# Altium footprint library nucleo-144.PcbLib: 1 footprints
Each footprint in its own frame and in the unit in brackets; x right, y up, seen from the top. Pads: shape width x height; smd on the part's side, far side on the other; paste and mask are expansions set on the pad; w line width, h text height; cw(c..) or ccw(c..) is an arc to the next point about the centre after c.
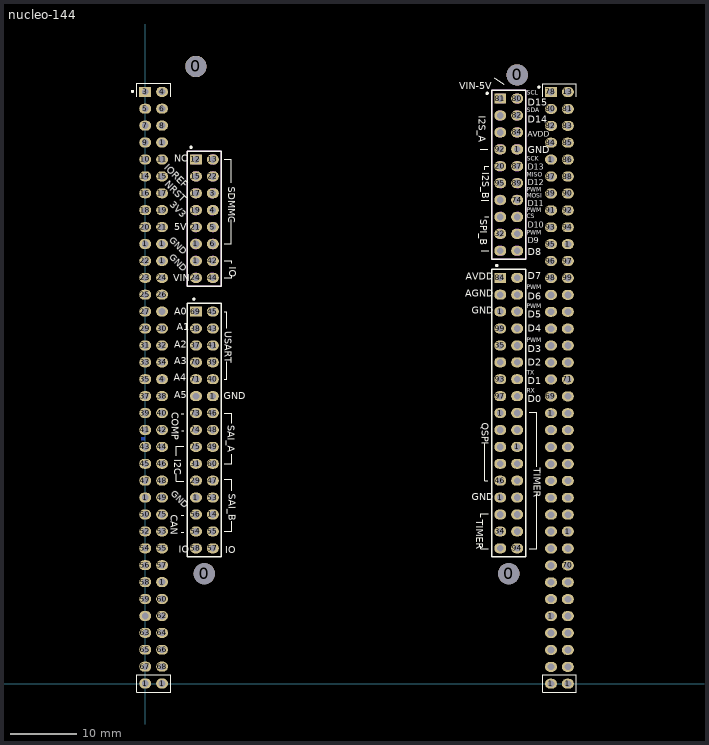
[diagram p0: the footprint, top view; thin cyan lines are the x and y axes]

## nucleo-144 [mm]
pads (248):
  round 3.2 hole 3.2 unplated: 0(7.62,92.71) 0(8.89,16.51) 0(54.61,16.51) 0(55.88,91.44)
  oval 1.8x1.5 hole 1.02: 1(0,0) 1(0,27.94) 1(0,66.04) 1(2.54,0) 1(2.54,15.24) 1(2.54,63.5) 1(2.54,66.04) 1(2.54,81.28) 1(7.62,27.94) 1(7.62,63.5) 1(7.62,66.04) 1(10.16,43.18) 1(53.34,27.94) 1(53.34,40.64) 1(53.34,55.88) 1(55.88,35.56) 1(55.88,80.264) 1(60.96,-0.025) 1(60.96,10.135) 1(60.96,40.615) 1(60.96,78.715) 1(63.5,-0.025) 1(63.5,22.835) 1(63.5,66.015) 3(10.16,73.66) 4(2.54,45.72) 4(2.54,88.9) 4(10.16,71.12) 5(0,86.36) 5(10.16,68.58) 6(2.54,86.36) 6(10.16,66.04) 7(0,83.82) 8(2.54,83.82) 9(0,81.28) 10(0,78.74) 11(2.54,78.74) 13(10.16,78.74) 13(63.5,88.875) 14(0,76.2) 14(10.16,25.4) 15(2.54,76.2) 15(7.62,76.2) 16(0,73.66) 17(2.54,73.66) 17(7.62,73.66) 18(0,71.12) 19(2.54,71.12) 19(7.62,71.12) 20(0,68.58) 20(53.34,77.724) 21(2.54,68.58) 21(7.62,68.58) 22(0,63.5) 22(10.16,76.2) 23(0,60.96) 24(2.54,60.96) 24(7.62,60.96) 25(0,58.42) 26(2.54,58.42) 27(0,55.88) 29(0,53.34) 29(7.62,30.48) 30(2.54,53.34) 31(0,50.8) 31(7.62,33.02) 32(2.54,50.8) 32(53.34,67.564) 33(0,48.26) 34(2.54,48.26) 34(53.34,22.86) 35(0,45.72) 35(53.34,50.8) 37(0,43.18) 37(7.62,50.8) 38(2.54,43.18) 38(7.62,53.34) 39(0,40.64) 39(10.16,48.26) 40(2.54,40.64) 40(10.16,45.72) 41(0,38.1) 41(10.16,50.8) 42(2.54,38.1) 42(10.16,63.5) 43(0,35.56) 43(10.16,53.34) 44(2.54,35.56) 44(10.16,60.96) 45(0,33.02) 45(10.16,55.88) 46(2.54,33.02) 46(10.16,40.64) 46(53.34,30.48) 47(0,30.48) 47(10.16,30.48) 48(2.54,30.48) 48(10.16,38.1) 49(2.54,27.94) 49(10.16,35.56) 50(0,25.4) 52(0,22.86) 53(2.54,22.86) 53(10.16,27.94) 54(0,20.32) 54(7.62,22.86) 55(2.54,20.32) 55(10.16,22.86) 56(0,17.78) 56(7.62,25.4) 57(2.54,17.78) 57(10.16,20.32) 58(0,15.24) 58(7.62,20.32) 59(0,12.7) 60(2.54,12.7) 60(10.16,33.02) 62(2.54,10.16) 63(0,7.62) 64(2.54,7.62) 65(0,5.08) 66(2.54,5.08) 67(0,2.54) 68(2.54,2.54) 69(60.96,43.155) 70(7.62,48.26) 70(63.5,17.755) 71(7.62,45.72) 71(63.5,45.695) 73(7.62,40.64) 74(7.62,38.1) 74(55.88,72.644) 75(2.54,25.4) 75(7.62,35.56) 80(55.88,87.884) 80(60.96,86.335) 81(63.5,86.335) 82(55.88,85.344) 82(60.96,83.795) 83(63.5,83.795) 84(55.88,82.804) 84(60.96,81.255) 85(63.5,81.255) 86(63.5,78.715) 87(55.88,77.724) 87(60.96,76.175) 88(63.5,76.175) 89(55.88,75.184) 89(60.96,73.635) 90(63.5,73.635) 91(60.96,71.095) 92(53.34,80.264) 92(63.5,71.095) 93(53.34,45.72) 93(60.96,68.555) 94(55.88,20.32) 94(63.5,68.555) 95(53.34,75.184) 95(60.96,66.015) 96(60.96,63.475) 97(53.34,43.18) 97(63.5,63.475) 98(60.96,60.935) 99(53.34,53.34) 99(63.5,60.935) 100(55.88,22.86) 100(60.96,58.395) 101(53.34,85.344) 101(63.5,58.395) 102(53.34,65.024) 102(60.96,55.855) 103(63.5,55.855) 104(53.34,72.644) 104(60.96,53.315) 105(53.34,82.804) 105(63.5,53.315) 106(53.34,70.104) 106(60.96,50.775) 107(53.34,58.42) 107(63.5,50.775) 108(60.96,48.235) 109(63.5,48.235) 110(60.96,45.695) 112(53.34,48.26) 112(63.5,43.155) 113(55.88,40.64) 113(63.5,40.615) 115(7.62,43.18) 115(63.5,38.075) 116(53.34,35.56) 116(60.96,35.535) 117(55.88,38.1) 117(63.5,35.535) 119(55.88,70.104) 119(63.5,32.995) 120(55.88,33.02) 120(60.96,30.455) 121(55.88,67.564) 121(63.5,30.455) 122(55.88,30.48) 122(60.96,27.915) 123(55.88,53.34) 123(63.5,27.915) 124(55.88,27.94) 124(60.96,25.375) 125(55.88,58.42) 125(63.5,25.375) 126(55.88,25.4) 126(60.96,22.835) 127(55.88,50.8) 127(60.96,20.295) 128(55.88,55.88) 128(63.5,20.295) 129(55.88,60.96) 129(60.96,17.755) 131(55.88,65.024) 131(60.96,15.215) 132(55.88,48.26) 132(63.5,15.215) 134(63.5,12.675) 135(53.34,20.32) 135(63.5,10.135) 136(60.96,7.595) 137(63.5,7.595) 138(60.96,5.055) 139(63.5,5.055) 140(60.96,2.515) 141(63.5,2.515) 144(55.88,45.72) 144(60.96,12.675) 145(0,10.16) 145(55.88,43.18) 146(53.34,38.1) 146(60.96,38.075) 148(53.34,33.02) 148(60.96,32.995) 149(2.54,55.88) 149(53.34,25.4)
  rect 1.8x1.5 hole 1.02: 3(0,88.9) 12(7.62,78.74) 69(7.62,55.88) 78(60.96,88.875) 81(53.34,87.884) 84(53.34,60.96)
Bottom Layer:
  pour cut-out: -0.567,37.033 -0.567,36.555 -0.051,36.555 -0.051,37.041
Top Overlay:
  circle w0.25: c-1.905,88.959 r0.127
  circle w0.25: c59.149,89.611 r0.127
  circle w0.25: c6.892,80.569 r0.127
  circle w0.25: c7.315,57.76 r0.127
  circle w0.25: c51.38,88.671 r0.127
  circle w0.25: c52.824,62.814 r0.127
  lines w0.127: -1.27,88.189 -1.27,90.17 3.81,90.17 3.81,88.189 ; 4.699,31.521 4.699,30.378 5.791,30.378 ; 4.699,34.214 4.699,35.662 5.791,35.662 ; 5.385,22.758 5.791,22.758 ; 5.385,25.298 5.791,25.298 ; 5.436,40.538 5.791,40.538 ; 5.486,37.998 5.791,37.998 ; 11.887,22.86 12.979,22.86 12.979,24.359 ; 11.887,30.683 12.979,30.683 12.979,28.956 ; 11.887,33.02 12.979,33.02 12.979,34.442 ; 11.887,40.64 12.979,40.64 12.979,39.141 ; 11.887,45.72 12.243,45.72 12.243,48.362 ; 11.887,55.88 12.243,55.88 12.243,53.391 ; 11.887,60.96 12.979,60.96 12.979,61.309 ; 11.887,63.5 12.979,63.5 12.979,63.119 ; 11.887,66.04 12.957,66.04 12.957,69.698 ; 11.887,78.74 12.957,78.74 12.957,75.235 ; 50.346,80.264 51.438,80.264 ; 50.419,20.625 50.419,20.218 51.511,20.218 ; 50.419,24.968 50.419,25.502 51.511,25.502 ; 50.521,65.024 51.613,65.024 ; 50.521,72.644 51.613,72.644 ; 51.003,36.03 51.003,30.48 51.489,30.48 ; 51.029,70.104 51.613,70.104 ; 51.029,77.165 51.029,77.724 51.613,77.724 ; 52.426,90.983 53.873,90.018 ; 57.709,20.218 58.801,20.218 58.801,28.448 ; 57.709,40.742 58.801,40.742 58.801,32.588 ; 59.69,88.163 59.69,90.145 64.77,90.145 64.77,88.163 ; 59.69,-1.295 59.69,1.295 64.77,1.295 64.77,-1.295 59.69,-1.295 ; 59.69,-1.295 59.69,-1.295 ; -1.27,-1.27 -1.27,1.321 3.81,1.321 3.81,-1.27 -1.27,-1.27
  lines w0.2: 6.35,19.05 6.35,57.15 11.43,57.15 11.43,19.05 6.35,19.05 ; 6.35,59.69 11.43,59.69 11.43,80.01 6.35,80.01 6.35,59.69 ; 52.07,19.05 57.15,19.05 57.15,62.23 52.07,62.23 52.07,19.05 ; 52.07,63.754 52.07,89.154 57.15,89.154 57.15,63.754 52.07,63.754
  text "TIMER" at 49.771,24.638 h1.02
  text "QSPI" at 50.571,39.218 h1.02
  text "GND" at 3.785,28.473 h0.97
  text "NC" at 4.338,78.359 h1.02
  text "PWM" at 57.353,73.635 h1.14
  text "PWM" at 57.353,70.587 h1.14
  text "D0" at 57.455,42.24 h1.02
  text "D1" at 57.455,44.983 h1.02
  text "GND" at 49.063,27.508 h1.02
  text "CS" at 57.353,69.647 h1.14
  text "MOSI" at 57.353,72.746 h1.14
  text "MISO" at 57.353,75.946 h1.14
  text "SCK" at 57.353,78.308 h1.14
  text "SDA" at 57.355,85.573 h1.14
  text "SCL" at 57.355,88.214 h1.14
  text "PWM" at 57.355,51.079 h1.14
  text "PWM" at 57.355,56.185 h1.14
  text "PWM" at 57.355,59 h1.14
  text "PWM" at 57.353,67.234 h1.14
  text "TIMER" at 58.369,32.41 h1.02
  text "SPI_B" at 50.317,69.774 h1.02
  text "I2S_A" at 50.114,85.319 h1.02
  text "COMP" at 4.013,40.792 h1.02
  text "I2C" at 4.369,33.731 h1.02
  text "CAN" at 3.861,25.375 h1.02
  text "SAI_B" at 12.522,28.524 h1.02
  text "SAI_A" at 12.37,38.786 h1.02
  text "USART" at 11.938,52.959 h1.02
  text "IO" at 12.649,62.636 h1.02
  text "SDMMC" at 12.497,74.676 h1.02
  text "GND" at 3.538,63.938 h0.97
  text "VIN" at 4.227,60.477 h1.02
  text "5V" at 4.343,68.123 h1.02
  text "3V3" at 3.632,71.882 h1.02
  text "NRST" at 2.845,74.93 h1.02
  text "GND" at 3.563,66.526 h0.97
  text "IOREF" at 2.819,77.445 h1.02
  text "D8" at 57.455,64.313 h1.02
  text "D9" at 57.455,66.167 h0.89
  text "D10" at 57.455,68.504 h0.89
  text "D11" at 57.455,71.679 h0.89
  text "D12" at 57.455,74.854 h0.89
  text "D13" at 57.455,77.165 h0.89
  text "GND" at 57.455,79.705 h1.02
  text "AVDD" at 57.455,82.169 h0.84
  text "D14" at 57.455,84.277 h1.02
  text "D15" at 57.455,86.843 h1.02
  text "D5" at 57.455,54.991 h1.02
  text "D4" at 57.455,52.857 h1.02
  text "D3" at 57.455,49.784 h1.02
  text "D2" at 57.455,47.752 h1.02
  text "TX" at 57.355,46.177 h1.14
  text "RX" at 57.355,43.491 h1.14
  text "D6" at 57.455,57.658 h1.02
  text "D7" at 57.455,60.731 h1.02
  text "A5" at 4.334,42.875 h1.02
  text "A4" at 4.285,45.466 h1.02
  text "A3" at 4.334,47.981 h1.02
  text "A2" at 4.334,50.419 h1.02
  text "A1" at 4.769,53.086 h1.02
  text "A0" at 4.334,55.423 h1.02
  text "VIN-5V" at 47.219,89.281 h1.02
  text "I2S_B" at 50.622,76.784 h1.02
  text "IO" at 12.014,19.609 h1.02
  text "IO" at 5.06,19.66 h1.02
  text "GND" at 11.786,42.697 h1.02
  text "GND" at 49.063,55.524 h1.02
  text "AGND" at 48.052,58.09 h1.02
  text "AVDD" at 48.158,60.655 h1.02
Bottom Overlay:
  lines w0.127: 51.384,57.353 51.46,57.353
  text "NC" at 4.954,78.308 h0.71
  text "PA12" at 66.523,76.454 h0.71
  text "PC11" at 6.287,88.468 h0.71
  text "PD2" at 5.842,85.928 h0.71
  text "E5V" at 5.842,83.388 h0.71
  text "GND" at 5.842,80.848 h0.71
  text "+3V3" at 6.502,75.768 h0.71
  text "NRST" at 6.452,73.304 h0.71
  text "3V3" at 5.842,70.688 h0.71
  text "+5V" at 5.842,68.148 h0.71
  text "GND" at 5.842,65.608 h0.71
  text "GND" at 5.842,63.068 h0.71
  text "PB0" at 5.842,47.828 h0.71
  text "PA4" at 5.842,50.368 h0.71
  text "PA1" at 5.546,52.908 h0.71
  text "PA0" at 5.842,55.448 h0.71
  text "VIN" at 5.694,60.528 h0.71
  text "PE2" at 5.842,32.588 h0.71
  text "PG3" at 5.842,35.128 h0.71
  text "PG2" at 5.842,37.668 h0.71
  text "PD3" at 5.842,40.208 h0.71
  text "PC0" at 5.842,42.748 h0.71
  text "PC1" at 5.546,45.288 h0.71
  text "PG1" at 5.546,17.348 h0.71
  text "PF9" at 5.842,19.888 h0.71
  text "PF8" at 5.842,22.428 h0.71
  text "PF2" at 5.842,24.968 h0.71
  text "PE4" at 5.842,30.048 h0.71
  text "PG11" at 5.258,3.404 h0.71
  text "PG13" at 5.232,6.807 h0.71
  text "PG10" at 6.583,7.188 h0.71
  text "PG15" at 6.583,9.728 h0.71
  text "PE6" at 5.842,12.268 h0.71
  text "GND" at 5.842,14.808 h0.71
  text "PE5" at 5.842,27.508 h0.71
  text "PD9" at -1.575,1.956 h0.71
  text "PH2" at -1.575,4.674 h0.71
  text "PG12" at -1.168,6.172 h0.71
  text "PG9" at -1.626,9.652 h0.71
  text "PE1" at -1.651,12.217 h0.71
  text "PF1" at -1.575,26.035 h0.71
  text "PF0" at -1.575,22.962 h0.71
  text "PD1" at -1.575,19.812 h0.71
  text "PD0" at -1.575,17.501 h0.71
  text "PG0" at -1.626,14.783 h0.71
  text "PD5" at -1.676,37.668 h0.71
  text "PD6" at -1.676,35.052 h0.71
  text "PD7" at -1.727,32.537 h0.71
  text "PE3" at -1.702,30.023 h0.71
  text "GND" at -1.575,27.737 h0.71
  text "OSCO" at -1.168,49.403 h0.71
  text "VBAT" at -1.168,46.838 h0.71
  text "PC2" at -1.575,44.755 h0.71
  text "PC3" at -1.575,42.164 h0.71
  text "PD4" at -1.651,40.183 h0.71
  text "PB7" at -1.575,63.043 h0.71
  text "PC13" at -1.168,59.614 h0.71
  text "PC14" at -1.168,56.998 h0.71
  text "PC15" at -1.346,54.661 h0.71
  text "PF7" at -1.575,75.641 h0.71
  text "PA13" at -1.168,72.212 h0.71
  text "PA14" at -1.168,69.647 h0.71
  text "PA15" at -1.168,67.158 h0.71
  text "GND" at -1.575,65.608 h0.71
  text "PC10" at -1.168,87.097 h0.71
  text "PC12" at -1.168,84.988 h0.71
  text "VDD" at -1.575,83.414 h0.71
  text "BT0" at -1.651,80.823 h0.71
  text "PF6" at -1.575,78.283 h0.71
  text "GND" at 59.715,78.283 h0.71
  text "AVDD" at 59.715,80.823 h0.71
  text "PB9" at 59.715,83.363 h0.71
  text "PB8" at 59.715,85.903 h0.71
  text "PC9" at 59.715,88.443 h0.71
  text "PC7" at 59.715,65.583 h0.71
  text "PB6" at 59.715,68.123 h0.71
  text "PA7" at 59.715,70.663 h0.71
  text "PA6" at 59.715,73.203 h0.71
  text "PA5" at 59.715,75.743 h0.71
  text "PB5" at 59.715,52.883 h0.71
  text "PB4" at 59.715,55.423 h0.71
  text "PB10" at 59.715,57.963 h0.71
  text "PA8" at 59.715,60.503 h0.71
  text "PA9" at 59.715,63.043 h0.71
  text "GND" at 59.715,40.183 h0.71
  text "PA3" at 59.715,42.723 h0.71
  text "PA2" at 59.715,45.263 h0.71
  text "PA10" at 59.715,47.803 h0.71
  text "PB3" at 59.715,50.343 h0.71
  text "PE12" at 59.715,27.483 h0.71
  text "PE10" at 59.715,30.023 h0.71
  text "PD11" at 59.715,32.563 h0.71
  text "PD12" at 59.715,35.103 h0.71
  text "PD13" at 59.715,37.643 h0.71
  text "PF12" at 59.715,14.783 h0.71
  text "PF13" at 59.715,17.323 h0.71
  text "PE13" at 59.715,19.863 h0.71
  text "PE15" at 59.715,22.403 h0.71
  text "PE14" at 59.715,24.943 h0.71
  text "PG14" at 59.715,12.243 h0.71
  text "GND" at 59.715,9.703 h0.71
  text "PD10" at 59.715,7.163 h0.71
  text "PG7" at 59.715,4.623 h0.71
  text "PG4" at 59.715,2.083 h0.71
  text "PF14" at 66.472,28.296 h0.71
  text "PF15" at 66.573,15.621 h0.71
  text "PF11" at 66.396,13.005 h0.71
  text "PE0" at 66.421,10.973 h0.71
  text "PG8" at 66.37,8.484 h0.71
  text "PG5" at 66.523,5.791 h0.71
  text "PG6" at 66.497,3.429 h0.71
  text "PD15" at 66.421,30.81 h0.71
  text "PE9" at 66.421,26.264 h0.71
  text "GND" at 66.421,23.749 h0.71
  text "PE11" at 66.548,20.879 h0.71
  text "PF3" at 66.497,18.491 h0.71
  text "PB15" at 66.345,58.674 h0.71
  text "PF5" at 66.472,46.609 h0.71
  text "PF4" at 66.421,44.018 h0.71
  text "PE8" at 66.37,41.554 h0.71
  text "PF10" at 66.624,38.633 h0.71
  text "PE7" at 66.421,36.195 h0.71
  text "PD14" at 66.573,33.477 h0.71
  text "PB1" at 66.243,61.747 h0.71
  text "PB14" at 66.396,56.058 h0.71
  text "PB13" at 66.548,53.645 h0.71
  text "AGND" at 66.614,51.308 h0.71
  text "PC4" at 66.37,48.997 h0.71
  text "PB2" at 66.396,64.44 h0.71
  text "GND" at 66.523,66.827 h0.71
  text "PB11" at 66.396,68.682 h0.71
  text "PB12" at 66.345,71.196 h0.71
  text "PA11" at 66.243,73.711 h0.71
  text "PD8" at 66.421,79.604 h0.71
  text "U5V" at 66.421,82.067 h0.71
  text "PC5" at 66.523,84.734 h0.71
  text "PC6" at 66.497,87.376 h0.71
  text "PC8" at 66.345,89.814 h0.71
  text "OSCI" at -1.168,51.943 h0.71
  text "PH1" at -1.575,24.689 h0.71
  text "PH0" at -1.575,21.641 h0.71
Mechanical 7:
  circle w0.2: c10.16,63.5 r0.684
  circle w0.2: c10.16,60.96 r0.684
  circle w0.2: c7.62,60.96 r0.684
  circle w0.2: c7.62,63.5 r0.684
  circle w0.2: c7.62,76.2 r0.684
  circle w0.2: c7.62,73.66 r0.684
  circle w0.2: c7.62,71.12 r0.684
  circle w0.2: c7.62,68.58 r0.684
  circle w0.2: c7.62,66.04 r0.684
  circle w0.2: c10.16,66.04 r0.684
  circle w0.2: c10.16,68.58 r0.684
  circle w0.2: c10.16,71.12 r0.684
  circle w0.2: c10.16,73.66 r0.684
  circle w0.2: c10.16,76.2 r0.684
  circle w0.2: c10.16,78.74 r0.684
  circle w0.2: c53.34,67.564 r0.684
  circle w0.2: c55.88,67.564 r0.684
  circle w0.2: c55.88,72.644 r0.684
  circle w0.2: c55.88,70.104 r0.684
  circle w0.2: c53.34,70.104 r0.684
  circle w0.2: c53.34,72.644 r0.684
  circle w0.2: c53.34,85.344 r0.684
  circle w0.2: c53.34,82.804 r0.684
  circle w0.2: c53.34,80.264 r0.684
  circle w0.2: c53.34,77.724 r0.684
  circle w0.2: c53.34,75.184 r0.684
  circle w0.2: c55.88,75.184 r0.684
  circle w0.2: c55.88,77.724 r0.684
  circle w0.2: c55.88,80.264 r0.684
  circle w0.2: c55.88,82.804 r0.684
  circle w0.2: c55.88,85.344 r0.684
  circle w0.2: c55.88,87.884 r0.684
  circle w0.2: c55.88,65.024 r0.684
  circle w0.2: c53.34,65.024 r0.684
  lines w0.2: 6.35,59.69 11.43,59.69 11.43,80.01 6.35,80.01 6.35,59.69 ; 6.985,78.105 6.985,79.375 8.255,79.375 8.255,78.105 6.985,78.105 ; 52.07,63.754 52.07,89.154 57.15,89.154 57.15,63.754 52.07,63.754 ; 52.705,87.249 52.705,88.519 53.975,88.519 53.975,87.249 52.705,87.249
3D body: height 9, standoff -2.54, extent 2.191,-0.347 2.889,0.35
3D body: height 2.54, standoff 0, extent 1.27,-1.27 3.81,1.27
3D body: height 2.54, standoff 0, extent -1.27,-1.27 1.27,1.27
3D body: height 9, standoff -2.54, extent -0.349,-0.347 0.349,0.35
3D body: height 2.54, standoff 0, extent -1.27,85.09 1.27,87.63
3D body: height 9, standoff -2.54, extent -0.349,86.013 0.349,86.71
3D body: height 2.54, standoff 0, extent -1.27,82.55 1.27,85.09
3D body: height 9, standoff -2.54, extent -0.349,83.473 0.349,84.17
3D body: height 9, standoff -2.54, extent -0.349,80.933 0.349,81.63
3D body: height 2.54, standoff 0, extent -1.27,80.01 1.27,82.55
3D body: height 9, standoff -2.54, extent -0.349,78.393 0.349,79.09
3D body: height 2.54, standoff 0, extent -1.27,77.47 1.27,80.01
3D body: height 9, standoff -2.54, extent -0.349,75.853 0.349,76.55
3D body: height 2.54, standoff 0, extent -1.27,74.93 1.27,77.47
3D body: height 2.54, standoff 0, extent -1.27,62.23 1.27,64.77
3D body: height 9, standoff -2.54, extent -0.349,63.153 0.349,63.85
3D body: height 2.54, standoff 0, extent -1.27,64.77 1.27,67.31
3D body: height 9, standoff -2.54, extent -0.349,65.693 0.349,66.39
3D body: height 2.54, standoff 0, extent -1.27,67.31 1.27,69.85
3D body: height 9, standoff -2.54, extent -0.349,68.233 0.349,68.93
3D body: height 9, standoff -2.54, extent -0.349,70.773 0.349,71.47
3D body: height 2.54, standoff 0, extent -1.27,69.85 1.27,72.39
3D body: height 9, standoff -2.54, extent -0.349,73.313 0.349,74.01
3D body: height 2.54, standoff 0, extent -1.27,72.39 1.27,74.93
3D body: height 2.54, standoff 0, extent -1.27,49.53 1.27,52.07
3D body: height 9, standoff -2.54, extent -0.349,50.453 0.349,51.15
3D body: height 2.54, standoff 0, extent -1.27,52.07 1.27,54.61
3D body: height 9, standoff -2.54, extent -0.349,52.993 0.349,53.69
3D body: height 2.54, standoff 0, extent -1.27,54.61 1.27,57.15
3D body: height 9, standoff -2.54, extent -0.349,55.533 0.349,56.23
3D body: height 9, standoff -2.54, extent -0.349,58.073 0.349,58.77
3D body: height 2.54, standoff 0, extent -1.27,57.15 1.27,59.69
3D body: height 9, standoff -2.54, extent -0.349,60.613 0.349,61.31
3D body: height 2.54, standoff 0, extent -1.27,59.69 1.27,62.23
3D body: height 2.54, standoff 0, extent -1.27,36.83 1.27,39.37
3D body: height 9, standoff -2.54, extent -0.349,37.753 0.349,38.45
3D body: height 2.54, standoff 0, extent -1.27,39.37 1.27,41.91
3D body: height 9, standoff -2.54, extent -0.349,40.293 0.349,40.99
3D body: height 2.54, standoff 0, extent -1.27,41.91 1.27,44.45
3D body: height 9, standoff -2.54, extent -0.349,42.833 0.349,43.53
3D body: height 9, standoff -2.54, extent -0.349,45.373 0.349,46.07
3D body: height 2.54, standoff 0, extent -1.27,44.45 1.27,46.99
3D body: height 9, standoff -2.54, extent -0.349,47.913 0.349,48.61
3D body: height 2.54, standoff 0, extent -1.27,46.99 1.27,49.53
3D body: height 2.54, standoff 0, extent -1.27,26.67 1.27,29.21
3D body: height 9, standoff -2.54, extent -0.349,27.593 0.349,28.29
3D body: height 2.54, standoff 0, extent -1.27,29.21 1.27,31.75
3D body: height 9, standoff -2.54, extent -0.349,30.133 0.349,30.83
3D body: height 9, standoff -2.54, extent -0.349,32.673 0.349,33.37
3D body: height 2.54, standoff 0, extent -1.27,31.75 1.27,34.29
3D body: height 9, standoff -2.54, extent -0.349,35.213 0.349,35.91
3D body: height 2.54, standoff 0, extent -1.27,34.29 1.27,36.83
3D body: height 2.54, standoff 0, extent -1.27,8.89 1.27,11.43
3D body: height 9, standoff -2.54, extent -0.349,9.813 0.349,10.51
3D body: height 2.54, standoff 0, extent -1.27,6.35 1.27,8.89
3D body: height 9, standoff -2.54, extent -0.349,7.273 0.349,7.97
3D body: height 9, standoff -2.54, extent -0.349,4.733 0.349,5.43
3D body: height 2.54, standoff 0, extent -1.27,3.81 1.27,6.35
3D body: height 9, standoff -2.54, extent -0.349,2.193 0.349,2.89
3D body: height 2.54, standoff 0, extent -1.27,1.27 1.27,3.81
3D body: height 2.54, standoff 0, extent -1.27,21.59 1.27,24.13
3D body: height 9, standoff -2.54, extent -0.349,22.513 0.349,23.21
3D body: height 2.54, standoff 0, extent -1.27,19.05 1.27,21.59
3D body: height 9, standoff -2.54, extent -0.349,19.973 0.349,20.67
3D body: height 9, standoff -2.54, extent -0.349,17.433 0.349,18.13
3D body: height 2.54, standoff 0, extent -1.27,16.51 1.27,19.05
3D body: height 9, standoff -2.54, extent -0.349,14.893 0.349,15.59
3D body: height 2.54, standoff 0, extent -1.27,13.97 1.27,16.51
3D body: height 9, standoff -2.54, extent -0.349,12.353 0.349,13.05
3D body: height 2.54, standoff 0, extent -1.27,11.43 1.27,13.97
3D body: height 9, standoff -2.54, extent -0.349,25.053 0.349,25.75
3D body: height 2.54, standoff 0, extent -1.27,24.13 1.27,26.67
3D body: height 2.54, standoff 0, extent -1.27,87.63 1.27,90.17
3D body: height 9, standoff -2.54, extent -0.347,88.551 0.35,89.249
3D body: height 2.54, standoff 0, extent 1.27,24.13 3.81,26.67
3D body: height 9, standoff -2.54, extent 2.191,25.053 2.889,25.75
3D body: height 2.54, standoff 0, extent 1.27,11.43 3.81,13.97
3D body: height 9, standoff -2.54, extent 2.191,12.353 2.889,13.05
3D body: height 2.54, standoff 0, extent 1.27,13.97 3.81,16.51
3D body: height 9, standoff -2.54, extent 2.191,14.893 2.889,15.59
3D body: height 2.54, standoff 0, extent 1.27,16.51 3.81,19.05
3D body: height 9, standoff -2.54, extent 2.191,17.433 2.889,18.13
3D body: height 9, standoff -2.54, extent 2.191,19.973 2.889,20.67
3D body: height 2.54, standoff 0, extent 1.27,19.05 3.81,21.59
3D body: height 9, standoff -2.54, extent 2.191,22.513 2.889,23.21
3D body: height 2.54, standoff 0, extent 1.27,21.59 3.81,24.13
3D body: height 2.54, standoff 0, extent 1.27,1.27 3.81,3.81
3D body: height 9, standoff -2.54, extent 2.191,2.193 2.889,2.89
3D body: height 2.54, standoff 0, extent 1.27,3.81 3.81,6.35
3D body: height 9, standoff -2.54, extent 2.191,4.733 2.889,5.43
3D body: height 9, standoff -2.54, extent 2.191,7.273 2.889,7.97
3D body: height 2.54, standoff 0, extent 1.27,6.35 3.81,8.89
3D body: height 9, standoff -2.54, extent 2.191,9.813 2.889,10.51
3D body: height 2.54, standoff 0, extent 1.27,8.89 3.81,11.43
3D body: height 2.54, standoff 0, extent 1.27,34.29 3.81,36.83
3D body: height 9, standoff -2.54, extent 2.191,35.213 2.889,35.91
3D body: height 2.54, standoff 0, extent 1.27,31.75 3.81,34.29
3D body: height 9, standoff -2.54, extent 2.191,32.673 2.889,33.37
3D body: height 9, standoff -2.54, extent 2.191,30.133 2.889,30.83
3D body: height 2.54, standoff 0, extent 1.27,29.21 3.81,31.75
3D body: height 9, standoff -2.54, extent 2.191,27.593 2.889,28.29
3D body: height 2.54, standoff 0, extent 1.27,26.67 3.81,29.21
3D body: height 2.54, standoff 0, extent 1.27,46.99 3.81,49.53
3D body: height 9, standoff -2.54, extent 2.191,47.913 2.889,48.61
3D body: height 2.54, standoff 0, extent 1.27,44.45 3.81,46.99
3D body: height 9, standoff -2.54, extent 2.191,45.373 2.889,46.07
3D body: height 9, standoff -2.54, extent 2.191,42.833 2.889,43.53
3D body: height 2.54, standoff 0, extent 1.27,41.91 3.81,44.45
3D body: height 9, standoff -2.54, extent 2.191,40.293 2.889,40.99
3D body: height 2.54, standoff 0, extent 1.27,39.37 3.81,41.91
3D body: height 9, standoff -2.54, extent 2.191,37.753 2.889,38.45
3D body: height 2.54, standoff 0, extent 1.27,36.83 3.81,39.37
3D body: height 2.54, standoff 0, extent 1.27,59.69 3.81,62.23
3D body: height 9, standoff -2.54, extent 2.191,60.613 2.889,61.31
3D body: height 2.54, standoff 0, extent 1.27,57.15 3.81,59.69
3D body: height 9, standoff -2.54, extent 2.191,58.073 2.889,58.77
3D body: height 9, standoff -2.54, extent 2.191,55.533 2.889,56.23
3D body: height 2.54, standoff 0, extent 1.27,54.61 3.81,57.15
3D body: height 9, standoff -2.54, extent 2.191,52.993 2.889,53.69
3D body: height 2.54, standoff 0, extent 1.27,52.07 3.81,54.61
3D body: height 9, standoff -2.54, extent 2.191,50.453 2.889,51.15
3D body: height 2.54, standoff 0, extent 1.27,49.53 3.81,52.07
3D body: height 2.54, standoff 0, extent 1.27,72.39 3.81,74.93
3D body: height 9, standoff -2.54, extent 2.191,73.313 2.889,74.01
3D body: height 2.54, standoff 0, extent 1.27,69.85 3.81,72.39
3D body: height 9, standoff -2.54, extent 2.191,70.773 2.889,71.47
3D body: height 9, standoff -2.54, extent 2.191,68.233 2.889,68.93
3D body: height 2.54, standoff 0, extent 1.27,67.31 3.81,69.85
3D body: height 9, standoff -2.54, extent 2.191,65.693 2.889,66.39
3D body: height 2.54, standoff 0, extent 1.27,64.77 3.81,67.31
3D body: height 9, standoff -2.54, extent 2.191,63.153 2.889,63.85
3D body: height 2.54, standoff 0, extent 1.27,62.23 3.81,64.77
3D body: height 2.54, standoff 0, extent 1.27,74.93 3.81,77.47
3D body: height 9, standoff -2.54, extent 2.191,75.853 2.889,76.55
3D body: height 2.54, standoff 0, extent 1.27,77.47 3.81,80.01
3D body: height 9, standoff -2.54, extent 2.191,78.393 2.889,79.09
3D body: height 2.54, standoff 0, extent 1.27,80.01 3.81,82.55
3D body: height 9, standoff -2.54, extent 2.191,80.933 2.889,81.63
3D body: height 9, standoff -2.54, extent 2.191,83.473 2.889,84.17
3D body: height 2.54, standoff 0, extent 1.27,82.55 3.81,85.09
3D body: height 9, standoff -2.54, extent 2.191,86.013 2.889,86.71
3D body: height 2.54, standoff 0, extent 1.27,85.09 3.81,87.63
3D body: height 9, standoff -2.54, extent 2.191,88.553 2.889,89.25
3D body: height 2.54, standoff 0, extent 1.27,87.63 3.81,90.17
3D body: height 9, standoff -2.54, extent 63.151,-0.373 63.849,0.325
3D body: height 2.54, standoff 0, extent 62.23,-1.295 64.77,1.245
3D body: height 2.54, standoff 0, extent 59.69,-1.295 62.23,1.245
3D body: height 9, standoff -2.54, extent 60.611,-0.373 61.309,0.325
3D body: height 2.54, standoff 0, extent 59.69,85.065 62.23,87.605
3D body: height 9, standoff -2.54, extent 60.611,85.987 61.309,86.685
3D body: height 2.54, standoff 0, extent 59.69,82.525 62.23,85.065
3D body: height 9, standoff -2.54, extent 60.611,83.447 61.309,84.145
3D body: height 9, standoff -2.54, extent 60.611,80.907 61.309,81.605
3D body: height 2.54, standoff 0, extent 59.69,79.985 62.23,82.525
3D body: height 9, standoff -2.54, extent 60.611,78.367 61.309,79.065
3D body: height 2.54, standoff 0, extent 59.69,77.445 62.23,79.985
3D body: height 9, standoff -2.54, extent 60.611,75.827 61.309,76.525
3D body: height 2.54, standoff 0, extent 59.69,74.905 62.23,77.445
3D body: height 2.54, standoff 0, extent 59.69,62.205 62.23,64.745
3D body: height 9, standoff -2.54, extent 60.611,63.127 61.309,63.825
3D body: height 2.54, standoff 0, extent 59.69,64.745 62.23,67.285
3D body: height 9, standoff -2.54, extent 60.611,65.667 61.309,66.365
3D body: height 2.54, standoff 0, extent 59.69,67.285 62.23,69.825
3D body: height 9, standoff -2.54, extent 60.611,68.207 61.309,68.905
3D body: height 9, standoff -2.54, extent 60.611,70.747 61.309,71.445
3D body: height 2.54, standoff 0, extent 59.69,69.825 62.23,72.365
3D body: height 9, standoff -2.54, extent 60.611,73.287 61.309,73.985
3D body: height 2.54, standoff 0, extent 59.69,72.365 62.23,74.905
3D body: height 2.54, standoff 0, extent 59.69,49.505 62.23,52.045
3D body: height 9, standoff -2.54, extent 60.611,50.427 61.309,51.125
3D body: height 2.54, standoff 0, extent 59.69,52.045 62.23,54.585
3D body: height 9, standoff -2.54, extent 60.611,52.967 61.309,53.665
3D body: height 2.54, standoff 0, extent 59.69,54.585 62.23,57.125
3D body: height 9, standoff -2.54, extent 60.611,55.507 61.309,56.205
3D body: height 9, standoff -2.54, extent 60.611,58.047 61.309,58.745
3D body: height 2.54, standoff 0, extent 59.69,57.125 62.23,59.665
3D body: height 9, standoff -2.54, extent 60.611,60.587 61.309,61.285
3D body: height 2.54, standoff 0, extent 59.69,59.665 62.23,62.205
3D body: height 2.54, standoff 0, extent 59.69,36.805 62.23,39.345
3D body: height 9, standoff -2.54, extent 60.611,37.727 61.309,38.425
3D body: height 2.54, standoff 0, extent 59.69,39.345 62.23,41.885
3D body: height 9, standoff -2.54, extent 60.611,40.267 61.309,40.965
3D body: height 2.54, standoff 0, extent 59.69,41.885 62.23,44.425
3D body: height 9, standoff -2.54, extent 60.611,42.807 61.309,43.505
3D body: height 9, standoff -2.54, extent 60.611,45.347 61.309,46.045
3D body: height 2.54, standoff 0, extent 59.69,44.425 62.23,46.965
3D body: height 9, standoff -2.54, extent 60.611,47.887 61.309,48.585
3D body: height 2.54, standoff 0, extent 59.69,46.965 62.23,49.505
3D body: height 2.54, standoff 0, extent 59.69,26.645 62.23,29.185
3D body: height 9, standoff -2.54, extent 60.611,27.567 61.309,28.265
3D body: height 2.54, standoff 0, extent 59.69,29.185 62.23,31.725
3D body: height 9, standoff -2.54, extent 60.611,30.107 61.309,30.805
3D body: height 9, standoff -2.54, extent 60.611,32.647 61.309,33.345
3D body: height 2.54, standoff 0, extent 59.69,31.725 62.23,34.265
3D body: height 9, standoff -2.54, extent 60.611,35.187 61.309,35.885
3D body: height 2.54, standoff 0, extent 59.69,34.265 62.23,36.805
3D body: height 2.54, standoff 0, extent 59.69,8.865 62.23,11.405
3D body: height 9, standoff -2.54, extent 60.611,9.787 61.309,10.485
3D body: height 2.54, standoff 0, extent 59.69,6.325 62.23,8.865
3D body: height 9, standoff -2.54, extent 60.611,7.247 61.309,7.945
3D body: height 9, standoff -2.54, extent 60.611,4.707 61.309,5.405
3D body: height 2.54, standoff 0, extent 59.69,3.785 62.23,6.325
3D body: height 9, standoff -2.54, extent 60.611,2.167 61.309,2.865
3D body: height 2.54, standoff 0, extent 59.69,1.245 62.23,3.785
3D body: height 2.54, standoff 0, extent 59.69,21.565 62.23,24.105
3D body: height 9, standoff -2.54, extent 60.611,22.487 61.309,23.185
3D body: height 2.54, standoff 0, extent 59.69,19.025 62.23,21.565
3D body: height 9, standoff -2.54, extent 60.611,19.947 61.309,20.645
3D body: height 9, standoff -2.54, extent 60.611,17.407 61.309,18.105
3D body: height 2.54, standoff 0, extent 59.69,16.485 62.23,19.025
3D body: height 9, standoff -2.54, extent 60.611,14.867 61.309,15.565
3D body: height 2.54, standoff 0, extent 59.69,13.945 62.23,16.485
3D body: height 9, standoff -2.54, extent 60.611,12.327 61.309,13.025
3D body: height 2.54, standoff 0, extent 59.69,11.405 62.23,13.945
3D body: height 9, standoff -2.54, extent 60.611,25.027 61.309,25.725
3D body: height 2.54, standoff 0, extent 59.69,24.105 62.23,26.645
3D body: height 2.54, standoff 0, extent 59.69,87.605 62.23,90.145
3D body: height 9, standoff -2.54, extent 60.613,88.525 61.31,89.224
3D body: height 2.54, standoff 0, extent 62.23,24.105 64.77,26.645
3D body: height 9, standoff -2.54, extent 63.151,25.027 63.849,25.725
3D body: height 2.54, standoff 0, extent 62.23,11.405 64.77,13.945
3D body: height 9, standoff -2.54, extent 63.151,12.327 63.849,13.025
3D body: height 2.54, standoff 0, extent 62.23,13.945 64.77,16.485
3D body: height 9, standoff -2.54, extent 63.151,14.867 63.849,15.565
3D body: height 2.54, standoff 0, extent 62.23,16.485 64.77,19.025
3D body: height 9, standoff -2.54, extent 63.151,17.407 63.849,18.105
3D body: height 9, standoff -2.54, extent 63.151,19.947 63.849,20.645
3D body: height 2.54, standoff 0, extent 62.23,19.025 64.77,21.565
3D body: height 9, standoff -2.54, extent 63.151,22.487 63.849,23.185
3D body: height 2.54, standoff 0, extent 62.23,21.565 64.77,24.105
3D body: height 2.54, standoff 0, extent 62.23,1.245 64.77,3.785
3D body: height 9, standoff -2.54, extent 63.151,2.167 63.849,2.865
3D body: height 2.54, standoff 0, extent 62.23,3.785 64.77,6.325
3D body: height 9, standoff -2.54, extent 63.151,4.707 63.849,5.405
3D body: height 9, standoff -2.54, extent 63.151,7.247 63.849,7.945
3D body: height 2.54, standoff 0, extent 62.23,6.325 64.77,8.865
3D body: height 9, standoff -2.54, extent 63.151,9.787 63.849,10.485
3D body: height 2.54, standoff 0, extent 62.23,8.865 64.77,11.405
3D body: height 2.54, standoff 0, extent 62.23,34.265 64.77,36.805
3D body: height 9, standoff -2.54, extent 63.151,35.187 63.849,35.885
3D body: height 2.54, standoff 0, extent 62.23,31.725 64.77,34.265
3D body: height 9, standoff -2.54, extent 63.151,32.647 63.849,33.345
3D body: height 9, standoff -2.54, extent 63.151,30.107 63.849,30.805
3D body: height 2.54, standoff 0, extent 62.23,29.185 64.77,31.725
3D body: height 9, standoff -2.54, extent 63.151,27.567 63.849,28.265
3D body: height 2.54, standoff 0, extent 62.23,26.645 64.77,29.185
3D body: height 2.54, standoff 0, extent 62.23,46.965 64.77,49.505
3D body: height 9, standoff -2.54, extent 63.151,47.887 63.849,48.585
3D body: height 2.54, standoff 0, extent 62.23,44.425 64.77,46.965
3D body: height 9, standoff -2.54, extent 63.151,45.347 63.849,46.045
3D body: height 9, standoff -2.54, extent 63.151,42.807 63.849,43.505
3D body: height 2.54, standoff 0, extent 62.23,41.885 64.77,44.425
3D body: height 9, standoff -2.54, extent 63.151,40.267 63.849,40.965
3D body: height 2.54, standoff 0, extent 62.23,39.345 64.77,41.885
3D body: height 9, standoff -2.54, extent 63.151,37.727 63.849,38.425
3D body: height 2.54, standoff 0, extent 62.23,36.805 64.77,39.345
3D body: height 2.54, standoff 0, extent 62.23,59.665 64.77,62.205
3D body: height 9, standoff -2.54, extent 63.151,60.587 63.849,61.285
3D body: height 2.54, standoff 0, extent 62.23,57.125 64.77,59.665
3D body: height 9, standoff -2.54, extent 63.151,58.047 63.849,58.745
3D body: height 9, standoff -2.54, extent 63.151,55.507 63.849,56.205
3D body: height 2.54, standoff 0, extent 62.23,54.585 64.77,57.125
3D body: height 9, standoff -2.54, extent 63.151,52.967 63.849,53.665
3D body: height 2.54, standoff 0, extent 62.23,52.045 64.77,54.585
3D body: height 9, standoff -2.54, extent 63.151,50.427 63.849,51.125
3D body: height 2.54, standoff 0, extent 62.23,49.505 64.77,52.045
3D body: height 2.54, standoff 0, extent 62.23,72.365 64.77,74.905
3D body: height 9, standoff -2.54, extent 63.151,73.287 63.849,73.985
3D body: height 2.54, standoff 0, extent 62.23,69.825 64.77,72.365
3D body: height 9, standoff -2.54, extent 63.151,70.747 63.849,71.445
3D body: height 9, standoff -2.54, extent 63.151,68.207 63.849,68.905
3D body: height 2.54, standoff 0, extent 62.23,67.285 64.77,69.825
3D body: height 9, standoff -2.54, extent 63.151,65.667 63.849,66.365
3D body: height 2.54, standoff 0, extent 62.23,64.745 64.77,67.285
3D body: height 9, standoff -2.54, extent 63.151,63.127 63.849,63.825
3D body: height 2.54, standoff 0, extent 62.23,62.205 64.77,64.745
3D body: height 2.54, standoff 0, extent 62.23,74.905 64.77,77.445
3D body: height 9, standoff -2.54, extent 63.151,75.827 63.849,76.525
3D body: height 2.54, standoff 0, extent 62.23,77.445 64.77,79.985
3D body: height 9, standoff -2.54, extent 63.151,78.367 63.849,79.065
3D body: height 2.54, standoff 0, extent 62.23,79.985 64.77,82.525
3D body: height 9, standoff -2.54, extent 63.151,80.907 63.849,81.605
3D body: height 9, standoff -2.54, extent 63.151,83.447 63.849,84.145
3D body: height 2.54, standoff 0, extent 62.23,82.525 64.77,85.065
3D body: height 9, standoff -2.54, extent 63.151,85.987 63.849,86.685
3D body: height 2.54, standoff 0, extent 62.23,85.065 64.77,87.605
3D body: height 9, standoff -2.54, extent 63.151,88.527 63.849,89.225
3D body: height 2.54, standoff 0, extent 62.23,87.605 64.77,90.145
3D body: height 2.54, standoff -10, extent 7.271,63.151 7.969,63.849
3D body: height 8.64, standoff 0, extent 6.35,62.228 8.89,64.768
3D body: height 2.54, standoff -10, extent 9.811,63.151 10.509,63.849
3D body: height 8.64, standoff 0, extent 8.89,62.228 11.43,64.768
3D body: height 2.54, standoff -10, extent 9.811,60.611 10.509,61.309
3D body: height 8.64, standoff 0, extent 8.89,59.688 11.43,62.228
3D body: height 2.54, standoff -10, extent 7.271,60.611 7.969,61.309
3D body: height 8.64, standoff 0, extent 6.35,59.688 8.89,62.228
3D body: height 8.64, standoff 0, extent 6.35,64.768 8.89,67.308
3D body: height 2.54, standoff -10, extent 7.271,65.691 7.969,66.389
3D body: height 8.64, standoff 0, extent 8.89,64.768 11.43,67.308
3D body: height 2.54, standoff -10, extent 9.811,65.691 10.509,66.389
3D body: height 8.64, standoff 0, extent 8.89,67.308 11.43,69.848
3D body: height 2.54, standoff -10, extent 9.811,68.231 10.509,68.929
3D body: height 8.64, standoff 0, extent 6.35,67.308 8.89,69.848
3D body: height 2.54, standoff -10, extent 7.271,68.231 7.969,68.929
3D body: height 8.64, standoff 0, extent 6.35,69.848 8.89,72.388
3D body: height 2.54, standoff -10, extent 7.271,70.771 7.969,71.469
3D body: height 8.64, standoff 0, extent 8.89,69.848 11.43,72.388
3D body: height 2.54, standoff -10, extent 9.811,70.771 10.509,71.469
3D body: height 8.64, standoff 0, extent 6.35,72.388 8.89,74.928
3D body: height 2.54, standoff -10, extent 7.271,73.311 7.969,74.009
3D body: height 8.64, standoff 0, extent 8.89,72.388 11.43,74.928
3D body: height 2.54, standoff -10, extent 9.811,73.311 10.509,74.009
3D body: height 8.64, standoff 0, extent 6.35,74.928 8.89,77.468
3D body: height 2.54, standoff -10, extent 7.271,75.851 7.969,76.549
3D body: height 8.64, standoff 0, extent 8.89,74.928 11.43,77.468
3D body: height 2.54, standoff -10, extent 9.811,75.851 10.509,76.549
3D body: height 8.64, standoff 0, extent 8.89,77.468 11.43,80.008
3D body: height 2.54, standoff -10, extent 9.811,78.391 10.509,79.089
3D body: height 8.64, standoff 0, extent 6.35,77.468 8.89,80.008
3D body: height 2.54, standoff -10, extent 7.271,78.391 7.969,79.089
3D body: height 8.64, standoff 0, extent 6.35,31.748 8.89,34.288
3D body: height 2.54, standoff -10, extent 7.271,32.671 7.969,33.369
3D body: height 8.64, standoff 0, extent 8.89,31.748 11.43,34.288
3D body: height 2.54, standoff -10, extent 9.811,32.671 10.509,33.369
3D body: height 2.54, standoff -10, extent 7.271,55.531 7.969,56.229
3D body: height 8.64, standoff 0, extent 6.35,54.608 8.89,57.148
3D body: height 2.54, standoff -10, extent 9.811,55.531 10.509,56.229
3D body: height 8.64, standoff 0, extent 8.89,54.608 11.43,57.148
3D body: height 2.54, standoff -10, extent 9.811,52.991 10.509,53.689
3D body: height 8.64, standoff 0, extent 8.89,52.068 11.43,54.608
3D body: height 2.54, standoff -10, extent 7.271,52.991 7.969,53.689
3D body: height 8.64, standoff 0, extent 6.35,52.068 8.89,54.608
3D body: height 2.54, standoff -10, extent 9.811,50.451 10.509,51.149
3D body: height 8.64, standoff 0, extent 8.89,49.528 11.43,52.068
3D body: height 2.54, standoff -10, extent 7.271,50.451 7.969,51.149
3D body: height 8.64, standoff 0, extent 6.35,49.528 8.89,52.068
3D body: height 2.54, standoff -10, extent 9.811,47.911 10.509,48.609
3D body: height 8.64, standoff 0, extent 8.89,46.988 11.43,49.528
3D body: height 2.54, standoff -10, extent 7.271,47.911 7.969,48.609
3D body: height 8.64, standoff 0, extent 6.35,46.988 8.89,49.528
3D body: height 2.54, standoff -10, extent 7.271,45.371 7.969,46.069
3D body: height 8.64, standoff 0, extent 6.35,44.448 8.89,46.988
3D body: height 2.54, standoff -10, extent 9.811,45.371 10.509,46.069
3D body: height 8.64, standoff 0, extent 8.89,44.448 11.43,46.988
3D body: height 2.54, standoff -10, extent 9.811,42.831 10.509,43.529
3D body: height 8.64, standoff 0, extent 8.89,41.908 11.43,44.448
3D body: height 2.54, standoff -10, extent 7.271,42.831 7.969,43.529
3D body: height 8.64, standoff 0, extent 6.35,41.908 8.89,44.448
3D body: height 8.64, standoff 0, extent 6.35,36.828 8.89,39.368
3D body: height 2.54, standoff -10, extent 7.271,37.751 7.969,38.449
3D body: height 8.64, standoff 0, extent 8.89,36.828 11.43,39.368
3D body: height 2.54, standoff -10, extent 9.811,37.751 10.509,38.449
3D body: height 8.64, standoff 0, extent 8.89,39.368 11.43,41.908
3D body: height 2.54, standoff -10, extent 9.811,40.291 10.509,40.989
3D body: height 8.64, standoff 0, extent 6.35,39.368 8.89,41.908
3D body: height 2.54, standoff -10, extent 7.271,40.291 7.969,40.989
3D body: height 2.54, standoff -10, extent 9.811,35.211 10.509,35.909
3D body: height 8.64, standoff 0, extent 8.89,34.288 11.43,36.828
3D body: height 2.54, standoff -10, extent 7.271,35.211 7.969,35.909
3D body: height 8.64, standoff 0, extent 6.35,34.288 8.89,36.828
3D body: height 8.64, standoff 0, extent 6.35,21.588 8.89,24.128
3D body: height 2.54, standoff -10, extent 7.271,22.511 7.969,23.209
3D body: height 8.64, standoff 0, extent 8.89,21.588 11.43,24.128
3D body: height 2.54, standoff -10, extent 9.811,22.511 10.509,23.209
3D body: height 2.54, standoff -10, extent 7.271,27.591 7.969,28.289
3D body: height 8.64, standoff 0, extent 6.35,26.668 8.89,29.208
3D body: height 2.54, standoff -10, extent 9.811,27.591 10.509,28.289
3D body: height 8.64, standoff 0, extent 8.89,26.668 11.43,29.208
3D body: height 2.54, standoff -10, extent 9.811,25.051 10.509,25.749
3D body: height 8.64, standoff 0, extent 8.89,24.128 11.43,26.668
3D body: height 2.54, standoff -10, extent 7.271,25.051 7.969,25.749
3D body: height 8.64, standoff 0, extent 6.35,24.128 8.89,26.668
3D body: height 8.64, standoff 0, extent 6.35,29.208 8.89,31.748
3D body: height 2.54, standoff -10, extent 7.271,30.131 7.969,30.829
3D body: height 8.64, standoff 0, extent 8.89,29.208 11.43,31.748
3D body: height 2.54, standoff -10, extent 9.811,30.131 10.509,30.829
3D body: height 2.54, standoff -10, extent 9.811,19.971 10.509,20.669
3D body: height 8.64, standoff 0, extent 8.89,19.048 11.43,21.588
3D body: height 2.54, standoff -10, extent 7.271,19.971 7.969,20.669
3D body: height 8.64, standoff 0, extent 6.35,19.048 8.89,21.588
3D body: height 8.64, standoff 0, extent 52.07,66.292 54.61,68.832
3D body: height 2.54, standoff -10, extent 52.991,67.215 53.689,67.913
3D body: height 8.64, standoff 0, extent 54.61,66.292 57.15,68.832
3D body: height 2.54, standoff -10, extent 55.531,67.215 56.229,67.913
3D body: height 2.54, standoff -10, extent 52.991,72.295 53.689,72.993
3D body: height 8.64, standoff 0, extent 52.07,71.372 54.61,73.912
3D body: height 2.54, standoff -10, extent 55.531,72.295 56.229,72.993
3D body: height 8.64, standoff 0, extent 54.61,71.372 57.15,73.912
3D body: height 2.54, standoff -10, extent 55.531,69.755 56.229,70.453
3D body: height 8.64, standoff 0, extent 54.61,68.832 57.15,71.372
3D body: height 2.54, standoff -10, extent 52.991,69.755 53.689,70.453
3D body: height 8.64, standoff 0, extent 52.07,68.832 54.61,71.372
3D body: height 8.64, standoff 0, extent 52.07,73.912 54.61,76.452
3D body: height 2.54, standoff -10, extent 52.991,74.835 53.689,75.533
3D body: height 8.64, standoff 0, extent 54.61,73.912 57.15,76.452
3D body: height 2.54, standoff -10, extent 55.531,74.835 56.229,75.533
3D body: height 8.64, standoff 0, extent 54.61,76.452 57.15,78.992
3D body: height 2.54, standoff -10, extent 55.531,77.375 56.229,78.073
3D body: height 8.64, standoff 0, extent 52.07,76.452 54.61,78.992
3D body: height 2.54, standoff -10, extent 52.991,77.375 53.689,78.073
3D body: height 8.64, standoff 0, extent 52.07,78.992 54.61,81.532
3D body: height 2.54, standoff -10, extent 52.991,79.915 53.689,80.613
3D body: height 8.64, standoff 0, extent 54.61,78.992 57.15,81.532
3D body: height 2.54, standoff -10, extent 55.531,79.915 56.229,80.613
3D body: height 8.64, standoff 0, extent 52.07,81.532 54.61,84.072
3D body: height 2.54, standoff -10, extent 52.991,82.455 53.689,83.153
3D body: height 8.64, standoff 0, extent 54.61,81.532 57.15,84.072
3D body: height 2.54, standoff -10, extent 55.531,82.455 56.229,83.153
3D body: height 8.64, standoff 0, extent 52.07,84.072 54.61,86.612
3D body: height 2.54, standoff -10, extent 52.991,84.995 53.689,85.693
3D body: height 8.64, standoff 0, extent 54.61,84.072 57.15,86.612
3D body: height 2.54, standoff -10, extent 55.531,84.995 56.229,85.693
3D body: height 8.64, standoff 0, extent 54.61,86.612 57.15,89.152
3D body: height 2.54, standoff -10, extent 55.531,87.535 56.229,88.233
3D body: height 8.64, standoff 0, extent 52.07,86.612 54.61,89.152
3D body: height 2.54, standoff -10, extent 52.991,87.535 53.689,88.233
3D body: height 2.54, standoff -10, extent 55.531,64.675 56.229,65.373
3D body: height 8.64, standoff 0, extent 54.61,63.752 57.15,66.292
3D body: height 2.54, standoff -10, extent 52.991,64.675 53.689,65.373
3D body: height 8.64, standoff 0, extent 52.07,63.752 54.61,66.292
3D body: height 8.64, standoff 0, extent 52.07,19.048 54.61,21.588
3D body: height 2.54, standoff -10, extent 52.991,19.971 53.689,20.669
3D body: height 8.64, standoff 0, extent 54.61,19.048 57.15,21.588
3D body: height 2.54, standoff -10, extent 55.531,19.971 56.229,20.669
3D body: height 2.54, standoff -10, extent 55.531,22.511 56.229,23.209
3D body: height 8.64, standoff 0, extent 54.61,21.588 57.15,24.128
3D body: height 2.54, standoff -10, extent 52.991,22.511 53.689,23.209
3D body: height 8.64, standoff 0, extent 52.07,21.588 54.61,24.128
3D body: height 8.64, standoff 0, extent 52.07,36.828 54.61,39.368
3D body: height 2.54, standoff -10, extent 52.991,37.751 53.689,38.449
3D body: height 8.64, standoff 0, extent 54.61,36.828 57.15,39.368
3D body: height 2.54, standoff -10, extent 55.531,37.751 56.229,38.449
3D body: height 2.54, standoff -10, extent 52.991,60.611 53.689,61.309
3D body: height 8.64, standoff 0, extent 52.07,59.688 54.61,62.228
3D body: height 2.54, standoff -10, extent 55.531,60.611 56.229,61.309
3D body: height 8.64, standoff 0, extent 54.61,59.688 57.15,62.228
3D body: height 2.54, standoff -10, extent 55.531,58.071 56.229,58.769
3D body: height 8.64, standoff 0, extent 54.61,57.148 57.15,59.688
3D body: height 2.54, standoff -10, extent 52.991,58.071 53.689,58.769
3D body: height 8.64, standoff 0, extent 52.07,57.148 54.61,59.688
3D body: height 2.54, standoff -10, extent 55.531,55.531 56.229,56.229
3D body: height 8.64, standoff 0, extent 54.61,54.608 57.15,57.148
3D body: height 2.54, standoff -10, extent 52.991,55.531 53.689,56.229
3D body: height 8.64, standoff 0, extent 52.07,54.608 54.61,57.148
3D body: height 2.54, standoff -10, extent 55.531,52.991 56.229,53.689
3D body: height 8.64, standoff 0, extent 54.61,52.068 57.15,54.608
3D body: height 2.54, standoff -10, extent 52.991,52.991 53.689,53.689
3D body: height 8.64, standoff 0, extent 52.07,52.068 54.61,54.608
3D body: height 2.54, standoff -10, extent 52.991,50.451 53.689,51.149
3D body: height 8.64, standoff 0, extent 52.07,49.528 54.61,52.068
3D body: height 2.54, standoff -10, extent 55.531,50.451 56.229,51.149
3D body: height 8.64, standoff 0, extent 54.61,49.528 57.15,52.068
3D body: height 2.54, standoff -10, extent 55.531,47.911 56.229,48.609
3D body: height 8.64, standoff 0, extent 54.61,46.988 57.15,49.528
3D body: height 2.54, standoff -10, extent 52.991,47.911 53.689,48.609
3D body: height 8.64, standoff 0, extent 52.07,46.988 54.61,49.528
3D body: height 8.64, standoff 0, extent 52.07,41.908 54.61,44.448
3D body: height 2.54, standoff -10, extent 52.991,42.831 53.689,43.529
3D body: height 8.64, standoff 0, extent 54.61,41.908 57.15,44.448
3D body: height 2.54, standoff -10, extent 55.531,42.831 56.229,43.529
3D body: height 8.64, standoff 0, extent 54.61,44.448 57.15,46.988
3D body: height 2.54, standoff -10, extent 55.531,45.371 56.229,46.069
3D body: height 8.64, standoff 0, extent 52.07,44.448 54.61,46.988
3D body: height 2.54, standoff -10, extent 52.991,45.371 53.689,46.069
3D body: height 2.54, standoff -10, extent 55.531,40.291 56.229,40.989
3D body: height 8.64, standoff 0, extent 54.61,39.368 57.15,41.908
3D body: height 2.54, standoff -10, extent 52.991,40.291 53.689,40.989
3D body: height 8.64, standoff 0, extent 52.07,39.368 54.61,41.908
3D body: height 8.64, standoff 0, extent 52.07,26.668 54.61,29.208
3D body: height 2.54, standoff -10, extent 52.991,27.591 53.689,28.289
3D body: height 8.64, standoff 0, extent 54.61,26.668 57.15,29.208
3D body: height 2.54, standoff -10, extent 55.531,27.591 56.229,28.289
3D body: height 2.54, standoff -10, extent 52.991,32.671 53.689,33.369
3D body: height 8.64, standoff 0, extent 52.07,31.748 54.61,34.288
3D body: height 2.54, standoff -10, extent 55.531,32.671 56.229,33.369
3D body: height 8.64, standoff 0, extent 54.61,31.748 57.15,34.288
3D body: height 2.54, standoff -10, extent 55.531,30.131 56.229,30.829
3D body: height 8.64, standoff 0, extent 54.61,29.208 57.15,31.748
3D body: height 2.54, standoff -10, extent 52.991,30.131 53.689,30.829
3D body: height 8.64, standoff 0, extent 52.07,29.208 54.61,31.748
3D body: height 8.64, standoff 0, extent 52.07,34.288 54.61,36.828
3D body: height 2.54, standoff -10, extent 52.991,35.211 53.689,35.909
3D body: height 8.64, standoff 0, extent 54.61,34.288 57.15,36.828
3D body: height 2.54, standoff -10, extent 55.531,35.211 56.229,35.909
3D body: height 2.54, standoff -10, extent 55.531,25.051 56.229,25.749
3D body: height 8.64, standoff 0, extent 54.61,24.128 57.15,26.668
3D body: height 2.54, standoff -10, extent 52.991,25.051 53.689,25.749
3D body: height 8.64, standoff 0, extent 52.07,24.128 54.61,26.668